# Altium footprint library IMU.PcbLib: 11 footprints
Each footprint in its own frame and in the unit in brackets; x right, y up, seen from the top. Pads: shape width x height; smd on the part's side, far side on the other; paste and mask are expansions set on the pad; w line width, h text height; cw(c..) or ccw(c..) is an arc to the next point about the centre after c.
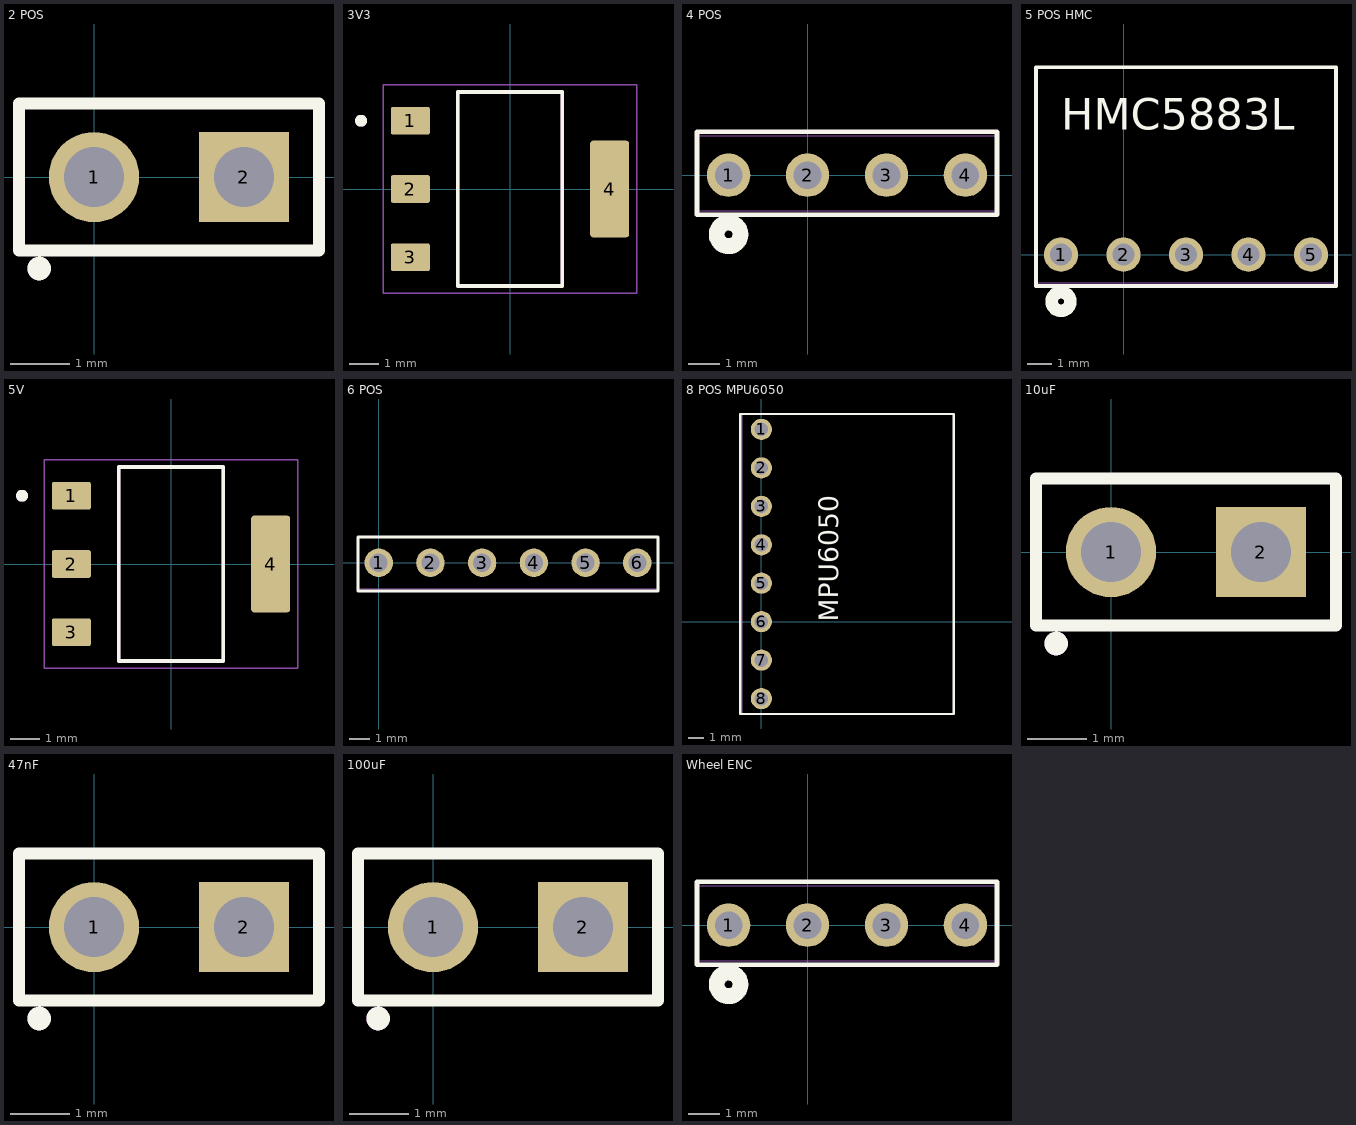
[diagram p0: the footprints below, top view; thin cyan lines are the x and y axes]

## 2 POS [mm]
pads (2):
  round 1.53 hole 1.02: 1(0,0)
  rect 1.53x1.53 / inner round 1.53 / far side rect 1.53x1.53 hole 1.02: 2(2.54,0)
Top Overlay:
  circle w0.2: c-0.929,-1.549 r0.1
  lines w0.2: -1.27,-1.245 3.81,-1.245 3.81,1.245 -1.27,1.245 -1.27,-1.245
Top 3D Body:
  circle w0.2: c-0.929,-1.549 r0.1
  lines w0.1: -1.27,-1.245 3.81,-1.245 3.81,1.245 -1.27,1.245 -1.27,-1.245

## 3V3 [mm]
height 1.8
pads (4):
  rrect15% 1.31x0.93 smd: 1(-3.345,2.29) 2(-3.345,0) 3(-3.345,-2.29)
  rrect15% 1.31x3.24 smd: 4(3.345,0)
Top Overlay:
  circle w0.2: c-5,2.29 r0.1
  lines w0.127: -1.753,-3.253 -1.753,3.253 1.753,3.253 1.753,-3.253 -1.753,-3.253
Mechanical 13:
  circle w0.2: c-5,2.29 r0.1
  lines w0.127: -1.753,-3.253 -1.753,3.253 1.753,3.253 1.753,-3.253 -1.753,-3.253
Mechanical 15:
  lines w0.05: -4.25,-3.502 4.25,-3.502 4.25,3.502 -4.25,3.502 -4.25,-3.502
3D body "step_temp.STEP": height 1.8, standoff 0, extent -3.345,-3.251 3.653,3.251

## 4 POS [mil]
pads (4):
  round 55 hole 35 paste-99999 mask+0: 1(-100,0) 2(0,0) 3(100,0) 4(200,0)
Top Overlay:
  circle w20: c-100,-75 r15
  lines w6: -140,-50 -140,55 240,55 240,-50 -140,-50
Bottom Overlay:
  circle w20: c-100,-75 r15
Top 3D Body:
  circle w1: c-100,0 r10
  lines w1: -140,-45 -140,50 240,50 240,-45 -140,-45

## 5 POS HMC [mil]
pads (5):
  round 55 hole 35 paste-99999 mask+0: 1(-100,0) 2(0,0) 3(100,0) 4(200,0) 5(300,0)
Top Overlay:
  circle w20: c-100,-75 r15
  lines w6: -140,-50 340,-50 340,300 -140,300 -140,-50
  text "HMC5883L" at -100,200 h50
Bottom Overlay:
  circle w20: c-100,-75 r15
Top 3D Body:
  circle w1: c-100,0 r10
  lines w1: -140,-45 340,-45 340,300 -140,300 -140,-45
  text "HMC5883L" at -100,200 h50

## 5V [mm]
height 1.8
pads (4):
  rrect15% 1.31x0.93 smd: 1(-3.345,2.29) 2(-3.345,0) 3(-3.345,-2.29)
  rrect15% 1.31x3.24 smd: 4(3.345,0)
Top Overlay:
  circle w0.2: c-5,2.29 r0.1
  lines w0.127: -1.753,-3.253 -1.753,3.253 1.753,3.253 1.753,-3.253 -1.753,-3.253
Mechanical 13:
  circle w0.2: c-5,2.29 r0.1
  lines w0.127: -1.753,-3.253 -1.753,3.253 1.753,3.253 1.753,-3.253 -1.753,-3.253
Mechanical 15:
  lines w0.05: -4.25,-3.502 4.25,-3.502 4.25,3.502 -4.25,3.502 -4.25,-3.502
3D body "step_temp.STEP": height 1.8, standoff 0, extent -3.345,-3.251 3.653,3.251

## 6 POS [mil]
pads (6):
  round 55 hole 35 paste-99999 mask+0: 1(0,0) 2(100,0) 3(200,0) 4(300,0) 5(400,0) 6(500,0)
Top Overlay:
  lines w6: -40,-55 540,-55 540,50 -40,50 -40,-55
Top 3D Body:
  circle w1: c300,0 r10
  lines w1: -40,-50 -40,50 540,50 540,-50 -40,-50

## 8 POS MPU6050 [mil]
pads (8):
  round 55 hole 35 paste-99999 mask+0: 1(0,500) 2(0,400) 3(0,300) 4(0,200) 5(0,100) 6(0,0) 7(0,-100) 8(0,-200)
Top Overlay:
  lines w6: -55,-240 500,-240 500,540 -55,540 -55,-240
  text "MPU6050" at 200,0 h50
Top 3D Body:
  circle w1: c0,200 r10
  circle w1: c0,-200 r10
  lines w1: -50,-240 500,-240 500,540 -50,540 -50,-240
  text "MPU6050" at 200,0 h50

## 10uF [mm]
pads (2):
  round 1.53 hole 1.02: 1(0,0)
  rect 1.53x1.53 / inner round 1.53 / far side rect 1.53x1.53 hole 1.02: 2(2.54,0)
Top Overlay:
  circle w0.2: c-0.929,-1.549 r0.1
  lines w0.2: -1.27,-1.245 -1.27,1.245 3.81,1.245 3.81,-1.245 -1.27,-1.245
Top 3D Body:
  circle w0.2: c-0.929,-1.549 r0.1
  lines w0.1: -1.27,-1.245 -1.27,1.245 3.81,1.245 3.81,-1.245 -1.27,-1.245

## 47nF [mm]
pads (2):
  round 1.53 hole 1.02: 1(0,0)
  rect 1.53x1.53 / inner round 1.53 / far side rect 1.53x1.53 hole 1.02: 2(2.54,0)
Top Overlay:
  circle w0.2: c-0.929,-1.549 r0.1
  lines w0.2: -1.27,-1.245 3.81,-1.245 3.81,1.245 -1.27,1.245 -1.27,-1.245
Top 3D Body:
  circle w0.2: c-0.929,-1.549 r0.1
  lines w0.1: -1.27,-1.245 3.81,-1.245 3.81,1.245 -1.27,1.245 -1.27,-1.245

## 100uF [mm]
pads (2):
  round 1.53 hole 1.02: 1(0,0)
  rect 1.53x1.53 / inner round 1.53 / far side rect 1.53x1.53 hole 1.02: 2(2.54,0)
Top Overlay:
  circle w0.2: c-0.929,-1.549 r0.1
  lines w0.2: -1.27,-1.245 -1.27,1.245 3.81,1.245 3.81,-1.245 -1.27,-1.245
Top 3D Body:
  circle w0.2: c-0.929,-1.549 r0.1
  lines w0.1: -1.27,-1.245 -1.27,1.245 3.81,1.245 3.81,-1.245 -1.27,-1.245

## Wheel ENC [mil]
pads (4):
  round 55 hole 35 paste-99999 mask+0: 1(-100,0) 2(0,0) 3(100,0) 4(200,0)
Top Overlay:
  circle w20: c-100,-75 r15
  lines w6: -140,-50 -140,55 240,55 240,-50 -140,-50
Bottom Overlay:
  circle w20: c-100,-75 r15
Top 3D Body:
  circle w1: c-100,0 r10
  lines w1: -140,-45 -140,50 240,50 240,-45 -140,-45